# Altium integrated library Ceramic Capacitor 8pF.IntLib: 1 symbol
Pins are listed as number, name and electrical type; pins without a type are passive.

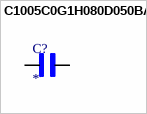
[diagram p0: symbol C1005C0G1H080D050BA]

## C1005C0G1H080D050BA
designator C?
8 pF Â±0.5pF 50V Ceramic Capacitor C0G, NP0 0402 (1005 Metric); MF: TDK; MP: C1005C0G1H080D050BA; SnapEDA_Link: https://www.snapeda.com/parts/C1005C0G1H080D050BA/TDK/view-part/?ref=snap; Package: 1005 TDK; Value: *; Check_prices: https://www.snapeda.com/parts/C1005C0G1H080D050BA/TDK/view-part/?ref=eda
footprint CAPC1005X55N
pins: 1, 2